# Altium schematic symbol library FH12-18S-0P5SH55.SchLib: 1 symbol
Pins are listed as number, name and electrical type; pins without a type are passive.

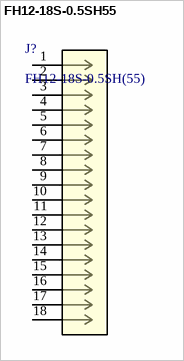
[diagram p0: symbol FH12-18S-0.5SH55]

## FH12-18S-0.5SH55
designator J?, comment FH12-18S-0.5SH(55)
Description; Manufacturer_Name: Hirose; Copyright: Copyright (C) 2026 Ultra Librarian. All rights reserved.; Manufacturer_Part_Number: FH12-18S-0.5SH(55); RefDes: RefDes; Type: Type
footprint CONN_FH12-18S-0.5SH-55_HIR
pins: 1, 2, 3, 4, 5, 6, 7, 8, 9, 10, 11, 12, 13, 14, 15, 16, 17, 18